# Altium footprint library Active-Crystal.PcbLib: 38 footprints (part 3 of 3)
Each footprint in its own frame and in the unit in brackets; x right, y up, seen from the top. Pads: shape width x height; smd on the part's side, far side on the other; paste and mask are expansions set on the pad; w line width, h text height; cw(c..) or ccw(c..) is an arc to the next point about the centre after c.
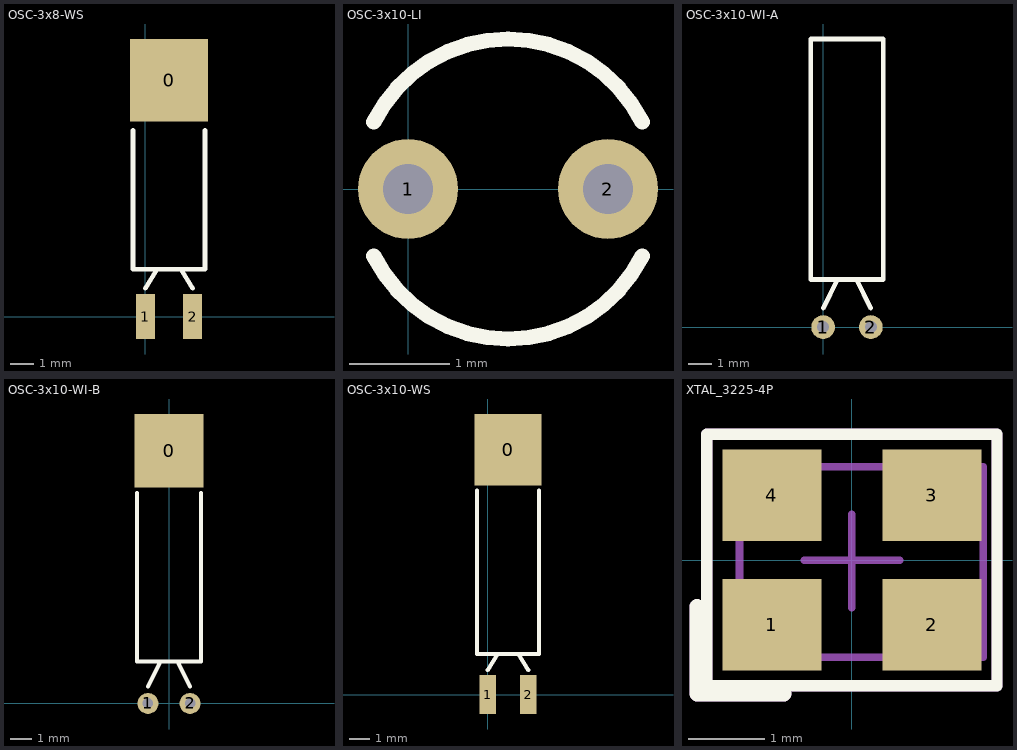
[diagram p2: the footprints below, top view; thin cyan lines are the x and y axes]

## OSC-3x8-WS [mm]
pads (3):
  rect 3.3x3.5 smd: 0(1,10)
  rect 0.8x1.9 smd: 1(0,0) 2(2,0)
Top Overlay:
  lines w0.2: -0.524,7.874 -0.524,2 2.524,2 2.524,7.874 ; 0,1.2 0.5,2 ; 1.5,2 2,1.2
3D body "OSC-3x8-WS-.STEP": height 3.03, standoff 0, extent -0.381,-0.424 2.619,10.076

## OSC-3x10-LI [mm]
pads (2):
  round 1 hole 0.5: 1(0,0) 2(2,0)
Top Overlay:
  lines w0.152: -0.342,-0.671 ccw(c1,0) 2.342,-0.671 ; -0.342,0.671 cw(c1,0) 2.342,0.671
3D body "OSC-3x10-LI-.STEP": height 11.1, standoff -2.5, extent -0.484,-1.524 2.516,1.476

## OSC-3x10-WI-A [mm]
pads (2):
  round 1 hole 0.5: 1(0,0) 2(2,0)
Top Overlay:
  lines w0.2: 0,0.8 0.6,2 ; 1.4,2 2,0.8 ; -0.524,2 -0.524,12.1 2.524,12.1 2.524,2 -0.524,2
3D body "OSC-3x10-WI-A.STEP": height 3.03, standoff -2.6, extent -0.508,-0.127 2.492,12.052

## OSC-3x10-WI-B [mm]
pads (3):
  rect 3.3x3.5 smd: 0(0,12)
  round 1 hole 0.5: 1(-1,0) 2(1,0)
Top Overlay:
  lines w0.2: -1.524,10 -1.524,2 1.524,2 1.524,10 ; -1,0.8 -0.4,2 ; 0.4,2 1,0.8
3D body "OSC-3x10-WI-B.STEP": height 3.03, standoff -2.6, extent -1.5,-0.127 1.5,12.052

## OSC-3x10-WS [mm]
pads (3):
  rect 3.3x3.5 smd: 0(1,12)
  rect 0.8x1.9 smd: 1(0,0) 2(2,0)
Top Overlay:
  lines w0.2: -0.524,10 -0.524,2 2.524,2 2.524,10 ; 0,1.2 0.5,2 ; 1.5,2 2,1.2
3D body "OSC-3x10-WS-.STEP": height 3.03, standoff 0, extent -0.508,-0.281 2.492,12.219

## XTAL_3225-4P [mm]
pads (4):
  rect 1.3x1.2 smd: 1(-1.05,-0.85) 2(1.05,-0.85) 3(1.05,0.85) 4(-1.05,0.85)
Top Overlay:
  lines w0.15: -1.905,-1.651 1.905,-1.651 1.905,1.651 -1.905,1.651 -1.905,-1.651
  lines w0.2: -2.032,-1.753 -0.889,-1.753 ; -2.032,-1.727 -2.032,-0.61
Top Component Outline:
  lines w0.1: -1.475,-1.275 -1.475,1.225 1.725,1.225 1.725,-1.275 -1.475,-1.275
Top Component Center:
  lines w0.1: -0.25,0 0.25,0 ; 0,-0.25 0,0.25
Top Value:
  text "'.Comment'" at -2.108,-0.442 h1.2
Top Designator:
  text "'.Designator'" at -3.437,-0.467 h1.2
Top Courtyard:
  lines w0.1: -0.625,0 0.625,0 ; 0,-0.625 0,0.6
Top Assembly (Mech20):
  lines w0.15: -1.905,-1.651 1.905,-1.651 1.905,1.651 -1.905,1.651 -1.905,-1.651
  lines w0.2: -2.032,-1.753 -0.889,-1.753 ; -2.032,-1.727 -2.032,-0.61
3D body "OSC 3225-4P.STEP": height 0.7, standoff -0.02, extent -1.473,-1.27 1.727,1.23